# Altium footprint library Chris_R.PcbLib: 69 footprints (part 1 of 5)
Each footprint in its own frame and in the unit in brackets; x right, y up, seen from the top. Pads: shape width x height; smd on the part's side, far side on the other; paste and mask are expansions set on the pad; w line width, h text height; cw(c..) or ccw(c..) is an arc to the next point about the centre after c.
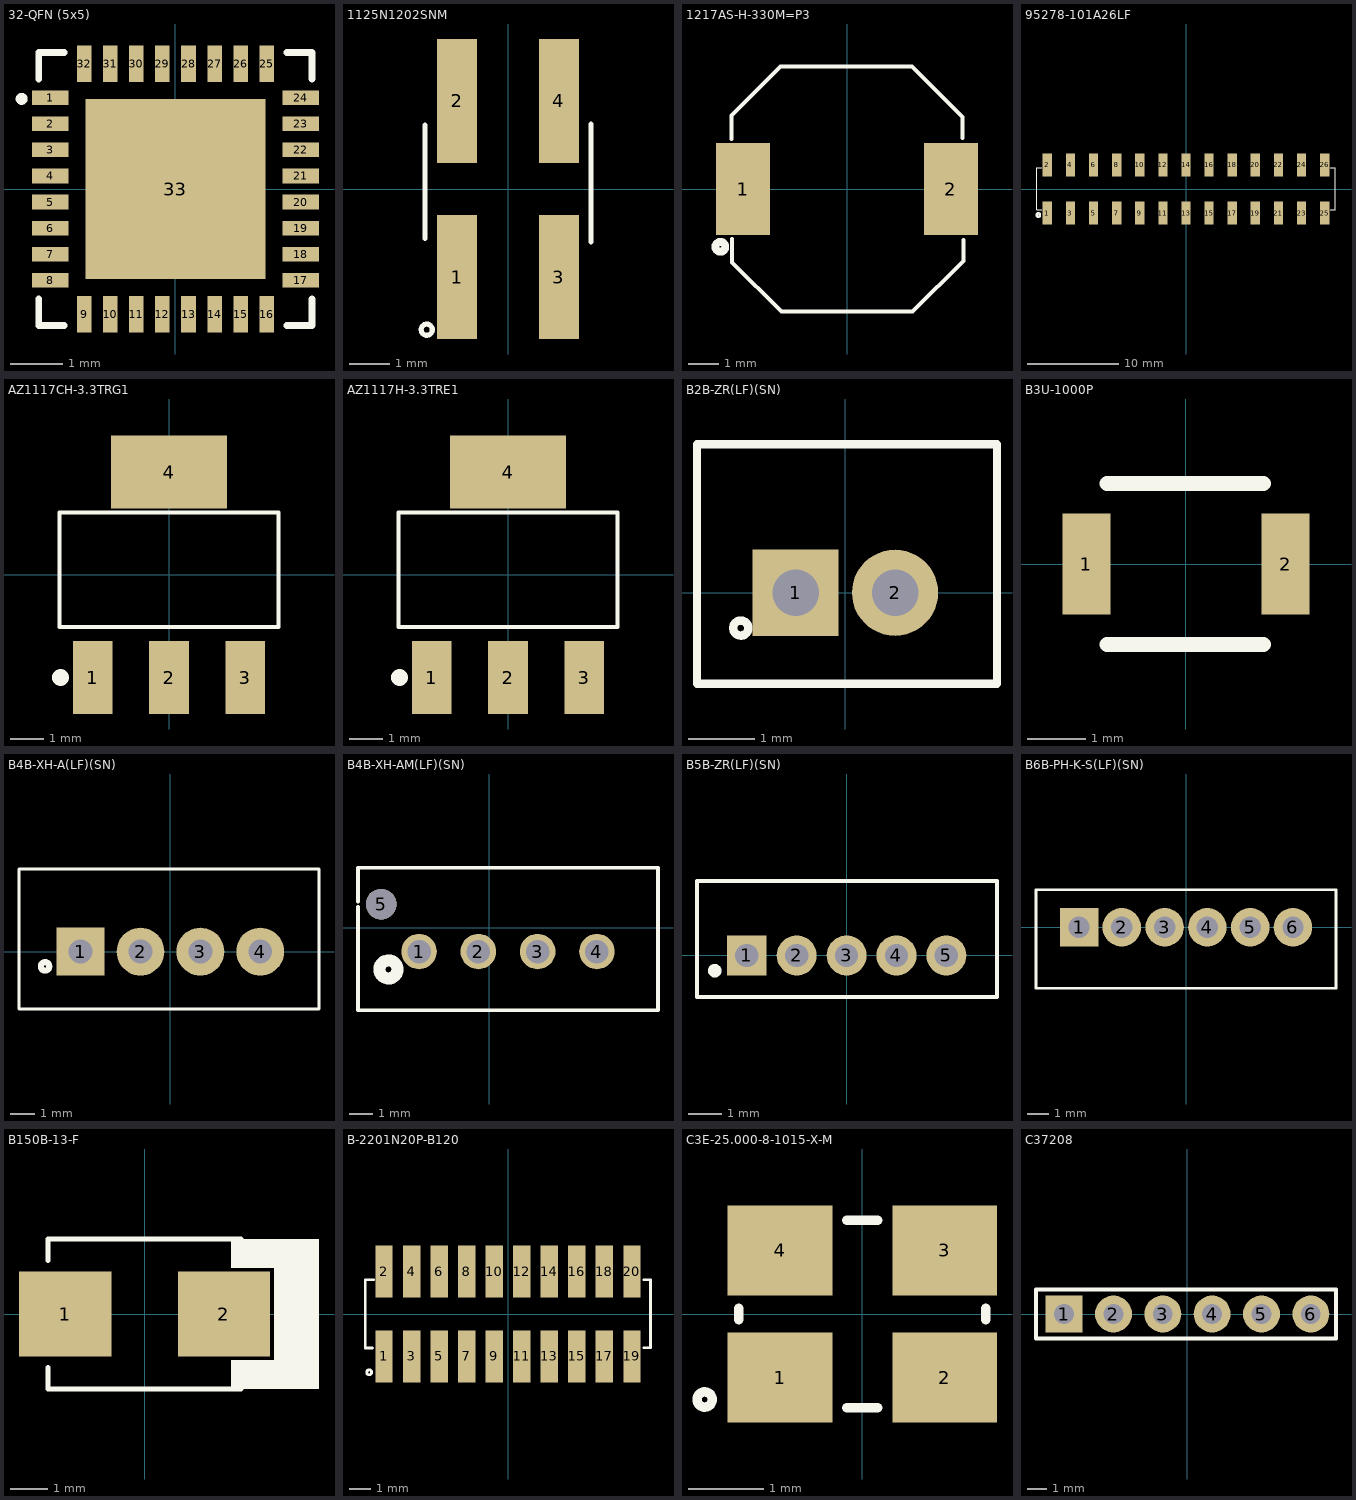
[diagram p0: the footprints below, top view; thin cyan lines are the x and y axes]

## 32-QFN (5x5) [mm]
pads (33):
  rect 0.7x0.28 smd: 1(-2.4,1.75) 2(-2.4,1.25) 3(-2.4,0.75) 4(-2.4,0.25) 5(-2.4,-0.25) 6(-2.4,-0.75) 7(-2.4,-1.25) 8(-2.4,-1.75) 17(2.4,-1.75) 18(2.4,-1.25) 19(2.4,-0.75) 20(2.4,-0.25) 21(2.4,0.25) 22(2.4,0.75) 23(2.4,1.25) 24(2.4,1.75)
  rect 0.28x0.7 smd: 9(-1.75,-2.4) 10(-1.25,-2.4) 11(-0.75,-2.4) 12(-0.25,-2.4) 13(0.25,-2.4) 14(0.75,-2.4) 15(1.25,-2.4) 16(1.75,-2.4) 25(1.75,2.4) 26(1.25,2.4) 27(0.75,2.4) 28(0.25,2.4) 29(-0.25,2.4) 30(-0.75,2.4) 31(-1.25,2.4) 32(-1.75,2.4)
  rect 3.45x3.45 smd: 33(0,0)
Top Overlay:
  circle w0.127: c-2.946,1.727 r0.051
  lines w0.127: -2.616,-2.108 -2.616,-2.616 -2.134,-2.616 ; -2.616,2.108 -2.616,2.616 -2.134,2.616 ; 2.134,-2.616 2.616,-2.616 2.616,-2.108 ; 2.134,2.616 2.616,2.616 2.616,2.108
3D body "WQFN32_5X5_TRI.step": height 0.84, standoff 0, extent -2.553,-2.553 2.553,2.553

## 1125N1202SNM [mm] "CONN HEADER 4 POS 2.54mm SMD"
pads (4):
  rect 1x3.1 smd: 1(-1.27,-2.2) 2(-1.27,2.2) 3(1.27,-2.2) 4(1.27,2.2)
Top Overlay:
  circle w0.127: c-2.032,-3.518 r0.14
  lines w0.127: -2.07,-1.232 -2.07,1.6 ; 2.07,-1.323 2.07,1.619
3D body "TSM-102-01-T-DV-P-TR.stp": height 10.88, standoff -0.04, extent -2.54,-3.848 2.54,3.848

## 1217AS-H-330M=P3 [mm] "FIXED IND 33UH 2.2A 132 MOHM SMD"
pads (2):
  rect 1.75x3 smd: 1(-3.375,0) 2(3.375,0)
Top Overlay:
  circle w0.254: c-4.115,-1.88 r0.161
  lines w0.127: -3.759,1.626 -3.759,2.388 -2.159,3.988 2.108,3.988 3.759,2.337 3.759,1.651 ; -3.734,-1.626 -3.734,-2.388 -2.134,-3.988 2.134,-3.988 3.785,-2.337 3.785,-1.651
3D body "1217AS-H-330M=P3.STEP": height 4.5, standoff 0, extent -4,-4 4,4

## 95278-101A26LF [mm]
pads (26):
  rect 1.02x2.5 smd: 1(-15.24,-2.65) 2(-15.24,2.65) 3(-12.7,-2.65) 4(-12.7,2.65) 5(-10.16,-2.65) 6(-10.16,2.65) 7(-7.62,-2.65) 8(-7.62,2.65) 9(-5.08,-2.65) 10(-5.08,2.65) 11(-2.54,-2.65) 12(-2.54,2.65) 13(0,-2.65) 14(0,2.65) 15(2.54,-2.65) 16(2.54,2.65) 17(5.08,-2.65) 18(5.08,2.65) 19(7.62,-2.65) 20(7.62,2.65) 21(10.16,-2.65) 22(10.16,2.65) 23(12.7,-2.65) 24(12.7,2.65) 25(15.24,-2.65) 26(15.24,2.65)
Top Overlay:
  circle w0.254: c-16.243,-2.857 r0.193
  lines w0.127: -15.875,-2.261 -16.396,-2.261 -16.396,2.337 -15.875,2.337 ; 15.875,-2.261 16.396,-2.261 16.396,2.337 15.875,2.337
3D body "95278_y01_26_asm.stp": height 9.66, standoff 0, extent -16.272,-3.632 16.348,3.654

## AZ1117CH-3.3TRG1 [mm] "15V 1.3V @ 800mA Fixed 3.3V SOT-223 Linear Voltage Regulators (LDO) ROHS"
pads (4):
  rect 1.2x2.2 smd: 1(-2.3,-3.1) 2(0,-3.1) 3(2.3,-3.1)
  rect 3.5x2.2 smd: 4(0,3.1)
Top Overlay:
  circle w0.254: c-3.277,-3.099 r0.127
  lines w0.127: 3.277,-1.575 -3.302,-1.575 -3.302,1.88 3.277,1.88 ; 3.302,-1.575 3.302,1.88
3D body "ncp1117st50t3g.stp": height 1.68, standoff 0, extent -3.249,-3.322 3.251,3.678

## AZ1117H-3.3TRE1 [mm]
pads (4):
  rect 1.2x2.2 smd: 1(-2.3,-3.1) 2(0,-3.1) 3(2.3,-3.1)
  rect 3.5x2.2 smd: 4(0,3.1)
Top Overlay:
  circle w0.254: c-3.277,-3.099 r0.127
  lines w0.127: 3.277,-1.575 -3.302,-1.575 -3.302,1.88 3.277,1.88 ; 3.302,-1.575 3.302,1.88
3D body "ncp1117st50t3g.stp": height 1.68, standoff 0, extent -3.249,-3.322 3.251,3.678

## B2B-ZR(LF)(SN) [mm]
pads (2):
  rect 1.3x1.3 hole 0.7: 1(-0.75,0)
  round 1.3 hole 0.7: 2(0.75,0)
Top Overlay:
  circle w0.127: c-1.575,-0.533 r0.114
  lines w0.127: -2.235,-1.372 2.286,-1.372 2.286,2.235 -2.235,2.235 -2.235,-1.372
3D body "User Library-B2B-ZR(LF)(SN).step": height 4.5, standoff -2.7, extent -2.225,-1.321 2.275,2.179

## B3U-1000P [mm] "SWITCH TACTILE SPST-NO 0.05A 12V"
pads (2):
  rect 0.82x1.72 smd: 1(-1.7,0) 2(1.7,0)
Top Overlay:
  lines w0.254: -1.346,-1.372 0,-1.372 1.321,-1.372 ; -1.346,1.372 0,1.372 1.321,1.372
3D body "User Library-OMRON B3U1000P.step": height 1.6, standoff 0, extent -2,-1.263 2,1.237

## B4B-XH-A(LF)(SN) [mm]
pads (4):
  rect 2x2 hole 1: 1(-3.75,0)
  round 2 hole 1: 2(-1.25,0) 3(1.25,0) 4(3.75,0)
Top Overlay:
  circle w0.254: c-5.236,-0.616 r0.176
  lines w0.127: -6.324,-2.398 -6.324,3.454 6.204,3.454 6.204,-2.398 -6.324,-2.398
3D body "B4B-XH-A-LF--SN---3DModel-STEP-56544.STEP": height 7, standoff -3.4, extent -6.258,-2.347 6.142,3.403

## B4B-XH-AM(LF)(SN) [mil]
pads (5):
  round 59 hole 39 mask+0: 1(-116.14,-39.37) 2(-17.72,-39.37) 3(80.71,-39.37) 4(179.13,-39.37)
  round 51 hole 51 unplated: 5(-179.13,39.37)
Top Overlay:
  circle w20: c-167,-69 r15
  lines w6: -217.5,35.16 -217.5,-136.51 280.5,-136.51 280.5,99.49 -217.5,99.49 -217.5,43.58
3D body: height 10, standoff 0, extent -116.14,-39.37 -106.14,-29.37

## B5B-ZR(LF)(SN) [mm] "CONN HEADER VERT 5POS 1.5MM"
pads (5):
  rect 1.2x1.2 hole 0.7: 1(-3,0)
  round 1.2 hole 0.7: 2(-1.5,0) 3(0,0) 4(1.5,0) 5(3,0)
Top Overlay:
  circle w0.254: c-3.962,-0.457 r0.076
  lines w0.127: -4.496,-1.245 -4.496,2.235 4.521,2.235 4.521,-1.245 -4.496,-1.245
3D body "B5B-ZR.STEP": height 4.5, standoff -2.7, extent -4.5,-1.239 4.5,2.261

## B6B-PH-K-S(LF)(SN) [mm]
pads (6):
  rect 1.8x1.8 hole 1: 1(-5,0)
  round 1.8 hole 1: 2(-3,0) 3(-1,0) 4(1,0) 5(3,0) 6(5,0)
Top Overlay:
  lines w0.127: -7.01,-2.845 7.01,-2.845 7.01,1.753 -7.01,1.753 -7.01,-2.845
3D body "User Library-b6b-ph-ks.step": height 6, standoff -3, extent -6.95,-2.794 6.95,1.706

## B150B-13-F [mm] "DIODE SCHOTTKY 50V 1A SMB"
pads (2):
  rect 2.5x2.3 smd: 1(-2.15,0) 2(2.15,0)
Top Overlay:
  rectangle: 2.337,1.245 4.724,2.032
  rectangle: 2.337,-2.032 4.724,-1.245
  rectangle: 3.505,-1.245 4.724,1.245
  lines w0.127: -2.616,-1.448 -2.616,-2.032 2.616,-2.032 ; -2.616,1.448 -2.616,2.032 2.616,2.032
3D body "SMB_DIO.step": height 2.45, standoff 0, extent -2.795,-1.97 2.795,1.97

## B-2201N20P-B120 [mm]
pads (20):
  rect 0.8x2.4 smd: 1(-5.715,-1.95) 2(-5.715,1.95) 3(-4.445,-1.95) 4(-4.445,1.95) 5(-3.175,-1.95) 6(-3.175,1.95) 7(-1.905,-1.95) 8(-1.905,1.95) 9(-0.635,-1.95) 10(-0.635,1.95) 11(0.635,-1.95) 12(0.635,1.95) 13(1.905,-1.95) 14(1.905,1.95) 15(3.175,-1.95) 16(3.175,1.95) 17(4.445,-1.95) 18(4.445,1.95) 19(5.715,-1.95) 20(5.715,1.95)
Top Overlay:
  circle w0.127: c-6.401,-2.687 r0.114
  lines w0.127: -6.248,-1.563 -6.579,-1.563 -6.579,1.577 -6.198,1.577 ; 6.261,1.583 6.566,1.583 6.566,-1.557 6.274,-1.557
3D body "_ _ _B102NFSS-RC (1).STEP": height 4.6, standoff -0.05, extent -6.525,-2.235 6.575,2.265

## C3E-25.000-8-1015-X-M [mm]
pads (4):
  rect 1.4x1.2 smd: 1(-1.1,-0.85) 2(1.1,-0.85) 3(1.1,0.85) 4(-1.1,0.85)
Top Overlay:
  circle w0.127: c-2.108,-1.143 r0.102
  lines w0.127: -1.651,-0.076 -1.651,0.076 ; -0.209,-1.25 0,-1.25 0.209,-1.25 ; -0.209,1.25 0,1.25 0.209,1.25 ; 1.651,-0.076 1.651,0.076
3D body "User Library-Crystal_ECX-32.STEP": height 0.82, standoff 0, extent -1.6,-1.25 1.6,1.25

## C37208 [mm]
pads (6):
  rect 1.9x1.9 hole 1.02: 1(-6.35,0)
  round 1.9 hole 1.02: 2(-3.81,0) 3(-1.27,0) 4(1.27,0) 5(3.81,0) 6(6.35,0)
Top Overlay:
  lines w0.2: -7.798,-1.27 -7.798,1.27 7.645,1.27 7.645,-1.27 -7.798,-1.27
3D body "User Library-1x6 TH Pitch 2_54mm.STEP": height 9.2, standoff -3.5, extent -7.633,-1.27 7.607,1.27